# Altium schematic symbol library CONN - B5B-XH-A(LF)(SN).SchLib: 1 symbol
Pins are listed as number, name and electrical type; pins without a type are passive.

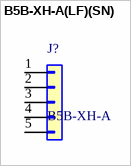
[diagram p0: symbol B5B-XH-A(LF)(SN)]

## B5B-XH-A(LF)(SN)
designator J?, comment B5B-XH-A
Connector Header Through Hole 5 position 0.098" (2.50mm); Manufacturer: JST Sales America Inc.; Manufacturer Part Number: B5B-XH-A(LF)(SN); Supplier 1: DigiKey; Supplier Part Number 1: 455-B5B-XH-A-ND; Supplier 2: LCSC; Supplier Part Number 2: C157991; Category: Headers, Male Pins; Case/Package: Through Hole; Operating Temperature: -25°C ~ 85°C; Lifecycle Status: Active; ComponentLink1Description: Datasheet; ComponentLink1URL: https://www.jst-mfg.com/product/pdf/eng/eXH.pdf; ComponentLink2Description: DigiKey; ComponentLink2URL: https://www.digikey.com/en/products/result?keywords=B5B-XH-A
footprint B5B-XH-A - JST (Huella B5B-XH-A - JST)
pins: 1 Pin_1, 2 Pin_2, 3 Pin_3, 4 Pin_4, 5 Pin_5